# Altium schematic symbol library GRM1555C1H150JA01D.SchLib: 1 symbol
Pins are listed as number, name and electrical type; pins without a type are passive.

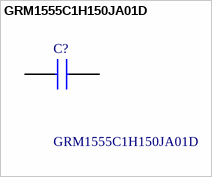
[diagram p0: symbol GRM1555C1H150JA01D]

## GRM1555C1H150JA01D
designator C?
Ceramic Capacitors MLCC 0402 15pF 50V Murata 0402 GRM 15pF Ceramic Multilayer Capacitor, 50 V dc C0G Dielectric +/-5% SMD; Manufacturer_Name: Murata Electronics; Geometry.Height: 0.7mm; Mouser Part Number: 81-GRM1555C1H150JA1D; Mouser Price/Stock: https://www.mouser.co.uk/ProductDetail/Murata-Electronics/GRM1555C1H150JA01D?qs=to8XolpOzrO6zLQlNbgtVA%3D%3D; Manufacturer_Part_Number: GRM1555C1H150JA01D; Datasheet Link: https://search.murata.co.jp/Ceramy/image/img/A01X/G101/ENG/GRM1555C1H150JA01-01A.pdf
footprint CAPC1005X70N
pins: 1, 2